# Altium footprint library HX1188NL.PcbLib: 3 footprints
Each footprint in its own frame and in the unit in brackets; x right, y up, seen from the top. Pads: shape width x height; smd on the part's side, far side on the other; paste and mask are expansions set on the pad; w line width, h text height; cw(c..) or ccw(c..) is an arc to the next point about the centre after c.
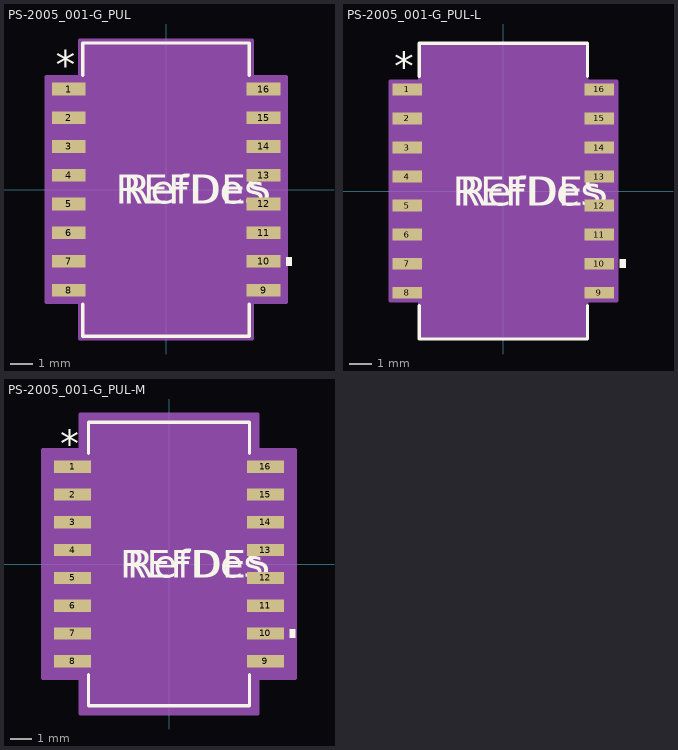
[diagram p0: the footprints below, top view; thin cyan lines are the x and y axes]

## PS-2005_001-G_PUL [mil]
pads (16):
  rect 59x22 smd paste+0 mask+0: 1(-169.5,175) 2(-169.5,125) 3(-169.5,75) 4(-169.5,25) 5(-169.5,-25) 6(-169.5,-75) 7(-169.5,-125) 8(-169.5,-175) 9(169.5,-175) 10(169.5,-125) 11(169.5,-75) 12(169.5,-25) 13(169.5,25) 14(169.5,75) 15(169.5,125) 16(169.5,175)
Top Overlay:
  region: 209,-117.5 219,-117.5 219,-132.5 209,-132.5
  lines w6: -145,-199.1 -145,-255 145,-255 145,-199.1 ; -145,199.1 -145,255 145,255 145,199.1
  text "REFDES" at -87.5,-25 h50
  text "*" at -192,192 h50
  text "RefDes" at -75,-25 h50
Mechanical 13:
  lines w0: -12,250 ccw(c0,250) 12,250
  lines w1: -185,-185 -185,-165 -140,-165 -140,-185 -185,-185 ; -185,-135 -185,-115 -140,-115 -140,-135 -185,-135 ; -185,-85 -185,-65 -140,-65 -140,-85 -185,-85 ; -185,-35 -185,-15 -140,-15 -140,-35 -185,-35 ; -185,15 -185,35 -140,35 -140,15 -185,15 ; -185,65 -185,85 -140,85 -140,65 -185,65 ; -185,115 -185,135 -140,135 -140,115 -185,115 ; -185,165 -185,185 -140,185 -140,165 -185,165 ; -140,-250 140,-250 140,250 -140,250 -140,-250 ; 140,-185 140,-165 185,-165 185,-185 140,-185 ; 140,-135 140,-115 185,-115 185,-135 140,-135 ; 140,-85 140,-65 185,-65 185,-85 140,-85 ; 140,-35 140,-15 185,-15 185,-35 140,-35 ; 140,15 140,35 185,35 185,15 140,15 ; 140,65 140,85 185,85 185,65 140,65 ; 140,115 140,135 185,135 185,115 140,115 ; 140,165 140,185 185,185 185,165 140,165
  text "*" at -137.5,197 h50
  text "RefDes2" at -87.5,-25 h50
Mechanical 15:
  region: -150,-196 -209,-196 -209,196 -150,196 -150,260 150,260 150,196 209,196 209,-196 150,-196 150,-260 -150,-260
  lines w6: -209,-196 -209,196 -150,196 -150,260 150,260 150,196 209,196 209,-196 150,-196 150,-260 -150,-260 -150,-196 -209,-196
3D body "PS-2005_001-G_PUL.step": height 235.12, standoff 0, extent -185,-250 185,250

## PS-2005_001-G_PUL-L [mil]
pads (16):
  rect 51x20 smd paste+0 mask+0: 1(-165.5,175) 2(-165.5,125) 3(-165.5,75) 4(-165.5,25) 5(-165.5,-25) 6(-165.5,-75) 7(-165.5,-125) 8(-165.5,-175) 9(165.5,-175) 10(165.5,-125) 11(165.5,-75) 12(165.5,-25) 13(165.5,25) 14(165.5,75) 15(165.5,125) 16(165.5,175)
Top Overlay:
  region: 201,-117.5 211,-117.5 211,-132.5 201,-132.5
  lines w6: -145,-198.1 -145,-255 145,-255 145,-198.1 ; -145,198.1 -145,255 145,255 145,198.1
  text "REFDES" at -87.5,-25 h50
  text "*" at -188,190 h50
  text "RefDes" at -75,-25 h50
Mechanical 13:
  lines w0: -12,250 ccw(c0,250) 12,250
  lines w1: -185,-185 -185,-165 -140,-165 -140,-185 -185,-185 ; -185,-135 -185,-115 -140,-115 -140,-135 -185,-135 ; -185,-85 -185,-65 -140,-65 -140,-85 -185,-85 ; -185,-35 -185,-15 -140,-15 -140,-35 -185,-35 ; -185,15 -185,35 -140,35 -140,15 -185,15 ; -185,65 -185,85 -140,85 -140,65 -185,65 ; -185,115 -185,135 -140,135 -140,115 -185,115 ; -185,165 -185,185 -140,185 -140,165 -185,165 ; -140,-250 140,-250 140,250 -140,250 -140,-250 ; 140,-185 140,-165 185,-165 185,-185 140,-185 ; 140,-135 140,-115 185,-115 185,-135 140,-135 ; 140,-85 140,-65 185,-65 185,-85 140,-85 ; 140,-35 140,-15 185,-15 185,-35 140,-35 ; 140,15 140,35 185,35 185,15 140,15 ; 140,65 140,85 185,85 185,65 140,65 ; 140,115 140,135 185,135 185,115 140,115 ; 140,165 140,185 185,185 185,165 140,165
  text "*" at -137.5,197 h50
  text "RefDes2" at -87.5,-25 h50
Mechanical 15:
  region: -144,-189 -195,-189 -195,189 -144,189 -144,254 144,254 144,189 195,189 195,-189 144,-189 144,-254 -144,-254
  lines w6: -195,-189 -195,189 -144,189 -144,254 144,254 144,189 195,189 195,-189 144,-189 144,-254 -144,-254 -144,-189 -195,-189
3D body "PS-2005_001-G_PUL.step": height 235.12, standoff 0, extent -185,-250 185,250

## PS-2005_001-G_PUL-M [mil]
pads (16):
  rect 67x22 smd paste+0 mask+0: 1(-173.5,175) 2(-173.5,125) 3(-173.5,75) 4(-173.5,25) 5(-173.5,-25) 6(-173.5,-75) 7(-173.5,-125) 8(-173.5,-175) 9(173.5,-175) 10(173.5,-125) 11(173.5,-75) 12(173.5,-25) 13(173.5,25) 14(173.5,75) 15(173.5,125) 16(173.5,175)
Top Overlay:
  region: 217,-117.5 227,-117.5 227,-132.5 217,-132.5
  lines w6: -145,-199.1 -145,-255 145,-255 145,-199.1 ; -145,199.1 -145,255 145,255 145,199.1
  text "REFDES" at -87.5,-25 h50
  text "*" at -196,192 h50
  text "RefDes" at -75,-25 h50
Mechanical 13:
  lines w0: -12,250 ccw(c0,250) 12,250
  lines w1: -185,-185 -185,-165 -140,-165 -140,-185 -185,-185 ; -185,-135 -185,-115 -140,-115 -140,-135 -185,-135 ; -185,-85 -185,-65 -140,-65 -140,-85 -185,-85 ; -185,-35 -185,-15 -140,-15 -140,-35 -185,-35 ; -185,15 -185,35 -140,35 -140,15 -185,15 ; -185,65 -185,85 -140,85 -140,65 -185,65 ; -185,115 -185,135 -140,135 -140,115 -185,115 ; -185,165 -185,185 -140,185 -140,165 -185,165 ; -140,-250 140,-250 140,250 -140,250 -140,-250 ; 140,-185 140,-165 185,-165 185,-185 140,-185 ; 140,-135 140,-115 185,-115 185,-135 140,-135 ; 140,-85 140,-65 185,-65 185,-85 140,-85 ; 140,-35 140,-15 185,-15 185,-35 140,-35 ; 140,15 140,35 185,35 185,15 140,15 ; 140,65 140,85 185,85 185,65 140,65 ; 140,115 140,135 185,135 185,115 140,115 ; 140,165 140,185 185,185 185,165 140,165
  text "*" at -137.5,197 h50
  text "RefDes2" at -87.5,-25 h50
Mechanical 15:
  region: -160,-206 -227,-206 -227,206 -160,206 -160,270 160,270 160,206 227,206 227,-206 160,-206 160,-270 -160,-270
  lines w6: -227,-206 -227,206 -160,206 -160,270 160,270 160,206 227,206 227,-206 160,-206 160,-270 -160,-270 -160,-206 -227,-206
3D body "PS-2005_001-G_PUL.step": height 235.12, standoff 0, extent -185,-250 185,250